# Altium footprint library Magnetic_Encoder_Pcb.PcbLib: 3 footprints
Each footprint in its own frame and in the unit in brackets; x right, y up, seen from the top. Pads: shape width x height; smd on the part's side, far side on the other; paste and mask are expansions set on the pad; w line width, h text height; cw(c..) or ccw(c..) is an arc to the next point about the centre after c.
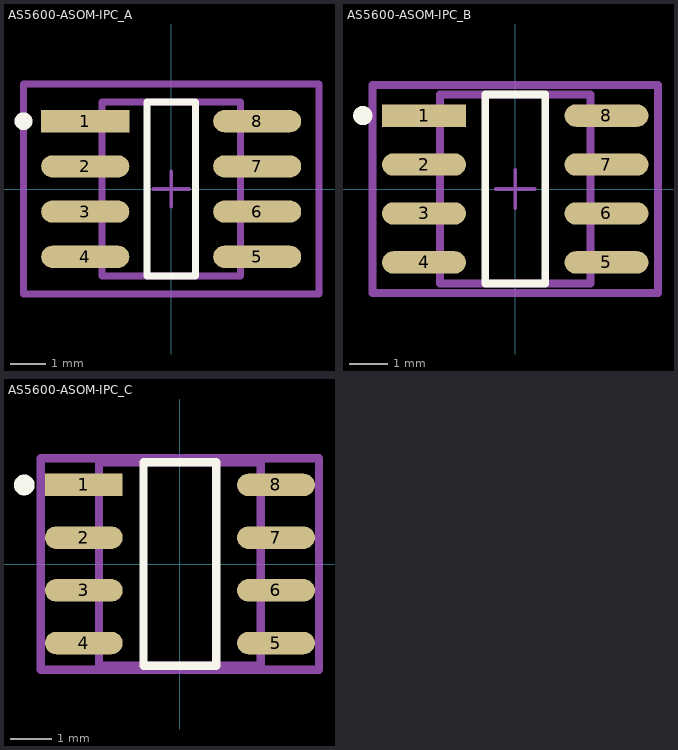
[diagram p0: the footprints below, top view; thin cyan lines are the x and y axes]

## AS5600-ASOM-IPC_A [mil]
pads (8):
  rect 97.4x24.49 smd paste+0 mask+0: 1(-95.12,75)
  rrect100% 97.4x24.49 smd paste+0 mask+0: 2(-95.12,25) 3(-95.12,-25) 4(-95.12,-75) 5(95.12,-75) 6(95.12,-25) 7(95.12,25) 8(95.12,75)
Top Overlay:
  circle w9.84: c-163.51,75 r4.92
  lines w7.87: -26.73,-96.46 -26.73,96.46 26.73,96.46 26.73,-96.46 -26.73,-96.46
Top Assembly:
  lines w7.87: -163.51,-116.14 -163.51,116.14 163.51,116.14 163.51,-116.14 -163.51,-116.14
  text ".Designator" at 0,7.39 h39.37
Top 3D Body:
  lines w7.87: -76.77,-96.46 -76.77,96.46 76.77,96.46 76.77,-96.46 -76.77,-96.46
Top Courtyard:
  lines w7.87: -163.51,-116.14 -163.51,116.14 163.51,116.14 163.51,-116.14 -163.51,-116.14
Top Component Center:
  lines w3.94: -19.68,0 19.68,0 ; 0,-19.68 0,19.68
3D body "SOIC8.step": height 65.86, standoff 0.5, extent -118.11,-96.46 118.11,96.46

## AS5600-ASOM-IPC_B [mil]
pads (8):
  rect 85.59x22.92 smd paste+0 mask+0: 1(-93.15,75)
  rrect100% 85.59x22.92 smd paste+0 mask+0: 2(-93.15,25) 3(-93.15,-25) 4(-93.15,-75) 5(93.15,-75) 6(93.15,-25) 7(93.15,25) 8(93.15,75)
Top Overlay:
  circle w9.84: c-155.63,75 r4.92
  lines w7.87: -30.67,-96.46 -30.67,96.46 30.67,96.46 30.67,-96.46 -30.67,-96.46
Top Assembly:
  lines w7.87: -145.79,-106.3 -145.79,106.3 145.79,106.3 145.79,-106.3 -145.79,-106.3
  text ".Designator" at 0,7.39 h39.37
Top 3D Body:
  lines w7.87: -76.77,-96.46 -76.77,96.46 76.77,96.46 76.77,-96.46 -76.77,-96.46
Top Courtyard:
  lines w7.87: -145.79,-106.3 -145.79,106.3 145.79,106.3 145.79,-106.3 -145.79,-106.3
Top Component Center:
  lines w3.94: -19.68,0 19.68,0 ; 0,-19.68 0,19.68
3D body "SOIC8.step": height 65.86, standoff 0.5, extent -118.11,-96.46 118.11,96.46

## AS5600-ASOM-IPC_C [mil]
pads (8):
  rect 73.78x21.34 smd paste+0 mask+0: 1(-91.18,75)
  rrect100% 73.78x21.34 smd paste+0 mask+0: 2(-91.18,25) 3(-91.18,-25) 4(-91.18,-75) 5(91.18,-75) 6(91.18,-25) 7(91.18,25) 8(91.18,75)
Top Overlay:
  circle w9.84: c-147.76,75 r4.92
  lines w7.87: -34.61,-96.46 -34.61,96.46 34.61,96.46 34.61,-96.46 -34.61,-96.46
Top Assembly:
  lines w7.87: -132.01,-100.39 -132.01,100.39 132.01,100.39 132.01,-100.39 -132.01,-100.39
  text ".Designator" at 0,7.39 h39.37
Top 3D Body:
  lines w7.87: -76.77,-96.46 -76.77,96.46 76.77,96.46 76.77,-96.46 -76.77,-96.46
Top Courtyard:
  lines w7.87: -132.01,-100.39 -132.01,100.39 132.01,100.39 132.01,-100.39 -132.01,-100.39
3D body "SOIC8.step": height 65.86, standoff 0.5, extent -118.11,-96.46 118.11,96.46